# Altium schematic symbol library Centralize.SchLib: 1081 symbols (part 24 of 26)
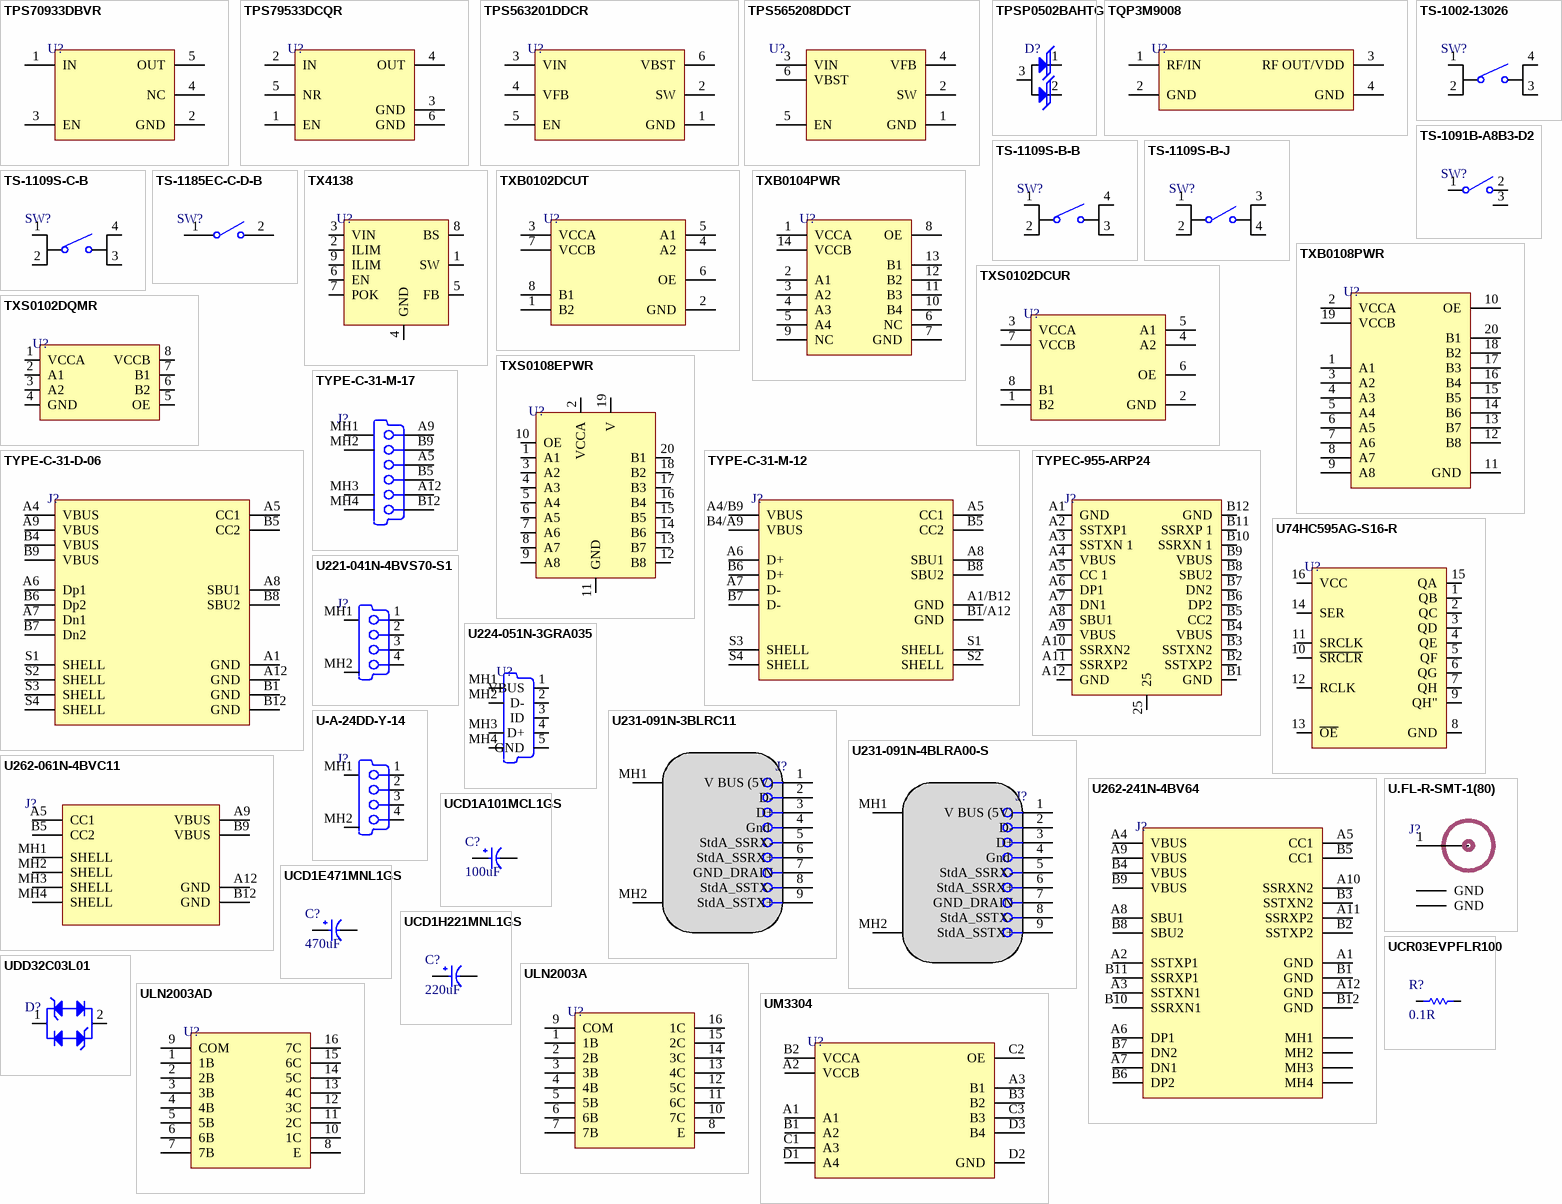
[diagram p70: symbols TPS70933DBVR to UM3304]

## ULN2003AD
designator U?
TRANS 7NPN DARL 50V 0.5A 16SOIC; Manufacturer: Texas Instruments; Manufacturer Part Number: ULN2003AD; Max Collector Current: 500mA; Number of Elements: 7; Polarity: NPN; Collector Emitter Saturation Voltage: 1.1V; Collector-emitter Voltage-Max: 1.6V; Max Power Dissipation: 25W; Item Type: IC; Supplier 1: Arrow Electronics; RoHS: Yes; Category: Integrated Circuits (ICs); Stock 1: 228; Pricing 1: 1=1.68680, 10=1.54200, 100=1.39890, 500=1.31050, 1000=1.23410 (USD); Mount: Surface Mount; Case/Package: SOIC; Number of Pins: 16; Weight: 0.004998oz; Contact Plating: Gold; Min Operating Temperature: -20°C; Max Operating Temperature: 70°C; Packaging: Rail/Tube; Collector Emitter Voltage (VCEO): 50V; Package Quantity: 40; Series: Automotive, AEC-Q100; Number of Drivers: 7; Collector Emitter Breakdown Voltage: 50V; Voltage Rating (DC): 50V; Current Rating: 500mA; Emitter Base Voltage (VEBO): 50V; Output Current: 500mA; Length: 9.9mm; Width: 3.91mm; Height: 1.58mm; Radiation Hardening: No; Lead Free: Lead Free; RoHS Compliant: Yes; Reach SVHC Compliant: Yes; ComponentLink1URL: https://datasheet.ciiva.com/15139/getdatasheetpartid-47909-15139875.pdf?src-supplier=Verical; ComponentLink1Description: https://datasheet.ciiva.com/15139/getdatasheetpartid-47909-15139875.pdf?src-supplier=Verical; ComponentLink2URL: https://datasheet.ciiva.com/1193/1908148-1193405.pdf?src-supplier=Element14; ComponentLink2Description: https://datasheet.ciiva.com/1193/1908148-1193405.pdf?src-supplier=Element14; ComponentLink3URL: https://datasheet.ciiva.com/1702/uln2003a-1702173.pdf?src-supplier=Digi-Key; ComponentLink3Description: https://datasheet.ciiva.com/1702/uln2003a-1702173.pdf?src-supplier=Digi-Key; ComponentLink4URL: https://datasheet.ciiva.com/14424/ulq2003a-14424058.pdf?src-supplier=Avnet; ComponentLink4Description: https://datasheet.ciiva.com/14424/ulq2003a-14424058.pdf?src-supplier=Avnet; Supplier Part Number 1: ULN2003AD; LCSC Part Number: C908113
footprint 16-SOIC
pins: 1 1B, 2 2B, 3 3B, 4 4B, 5 5B, 6 6B, 7 7B, 8 E, 9 COM, 10 1C, 11 2C, 12 3C, 13 4C, 14 5C, 15 6C, 16 7C

## UM3304
designator U?
4 BIT BIDIRECTIONAL TRANSLATOR; Manufacturer: Union Semiconductor; Manufacturer Part Number: UM3304; Item Type: IC; Supplier 1: Arrow Electronics; RoHS: No; Supplier Part Number 1: UM3304
footprint 12-CSP (1.86x1.36)
pins: A1 A1 , A2 VCCB, A3 B1, B1 A2, B2 VCCA, B3 B2, C1 A3, C2 OE, C3 B3, D1 A4, D2 GND, D3 B4

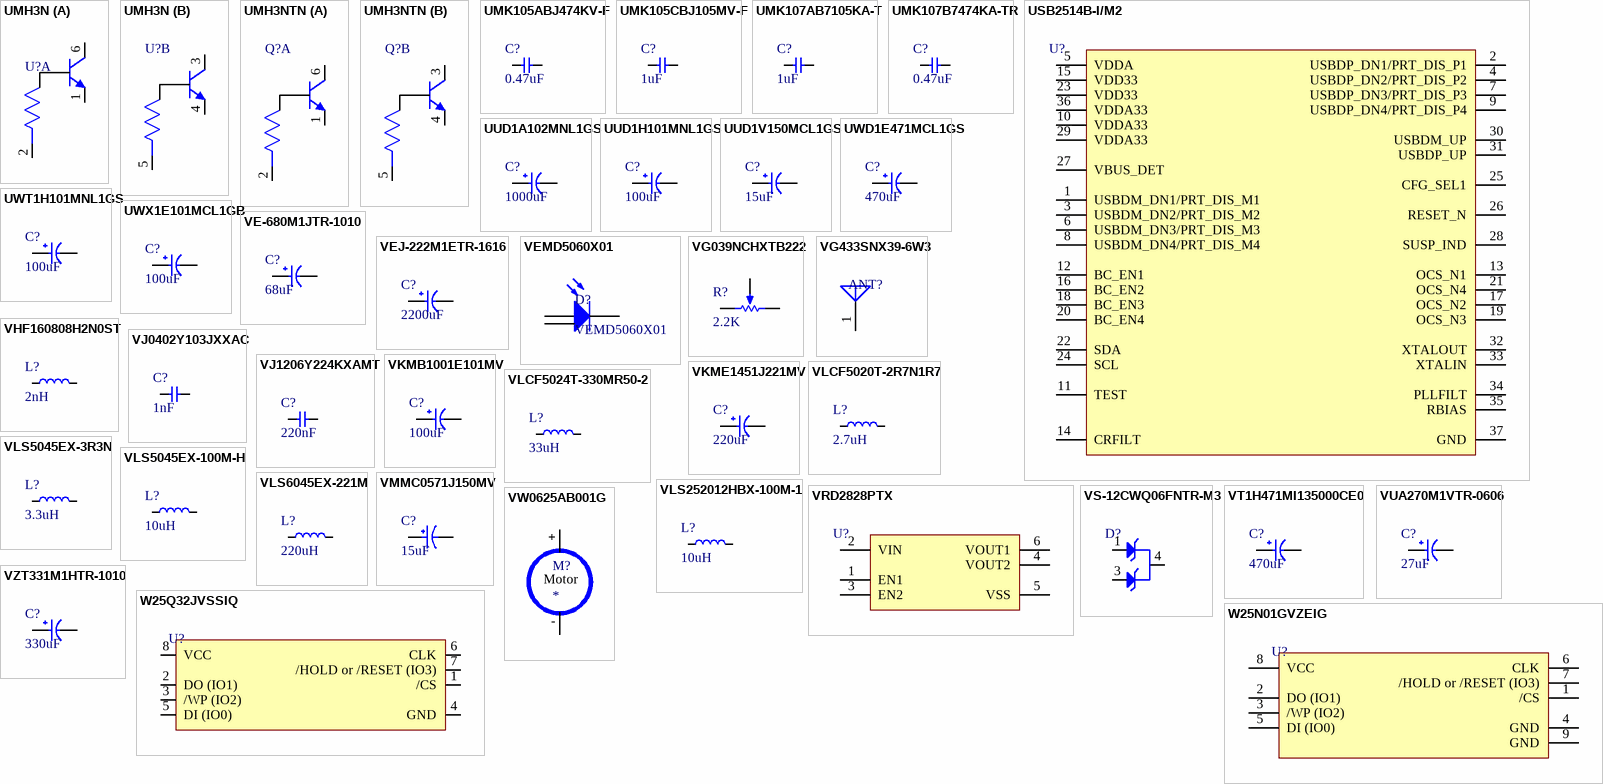
[diagram p44: symbols UMH3N to W25Q32JVSSIQ]

## UMH3N
designator U?
2 NPN pre-biased (Dual) 150mW 100mA 50V SC-70-6(SOT-363) Digital Transistors ROHS; Manufacturer: Changjiang; Manufacturer Part Number: UMH3N; Footprint: SC-70-6(SOT-363); ComponentLink1Description: LCSC; ComponentLink1URL: https://www.lcsc.com/product-detail/Digital-Transistors_Jiangsu-Changjing-Electronics-Technology-Co-Ltd-UMH3N_C62892.html; LCSC Part Number: C62892; Item Type: Transistor
footprint SC-70-6_
part A pins: 1 E, 2, 6 C
part B pins: 3 C, 4 E, 5

## UMH3NTN
designator Q?
TRANS 2NPN PREBIAS 0.15W UMT6; Manufacturer: Rohm; Manufacturer Part Number: UMH3NTN; Collector Emitter Voltage (VCEO): 50V; Emitter Base Voltage (VEBO): 5V; Max Collector Current: 100mA; Element Configuration: Dual; hFE Min: 100; Polarity: NPN; Power Dissipation: 150mW; Transition Frequency: 250MHz; Item Type: Transistor; Supplier 1: Digi-Key; Stock 1: 12797; Pricing 1: 1=0.39, 10=0.293, 25=0.264, 100=0.1392, 500=0.12336, 1000=0.096 (USD); Mount: Surface Mount; Case/Package: SOT-363; Number of Pins: 6; Min Operating Temperature: -55°C; Max Operating Temperature: 150°C; Max Output Current: 100mA; Operating Supply Voltage: 50V; Packaging: Tape and Reel; Package Quantity: 1; Continuous Collector Current: 100mA; Collector Emitter Breakdown Voltage: 50V; Max Power Dissipation: 150mW; Max Breakdown Voltage: 50V; Voltage Rating (DC): 50V; Current Rating: 100mA; Collector Base Voltage (VCBO): 50V; Radiation Hardening: No; REACH SVHC: No SVHC; Lead Free: Lead Free; ComponentLink1URL: http://www.farnell.com/datasheets/1645293.pdf?src-supplier=Element14; ComponentLink1Description: http://www.farnell.com/datasheets/1645293.pdf?src-supplier=Element14; ComponentLink2URL: http://rohmfs.rohm.com/en/products/databook/datasheet/discrete/transistor/digital/emh3t2r-e.pdf?src-supplier=Digi-Key; ComponentLink2Description: http://rohmfs.rohm.com/en/products/databook/datasheet/discrete/transistor/digital/emh3t2r-e.pdf?src-supplier=Digi-Key; ComponentLink3URL: http://rohmfs.rohm.com/en/techdata_basic/transistor/taping/UMT6_TN_taping.pdf?src-supplier=Digi-Key; ComponentLink3Description: http://rohmfs.rohm.com/en/techdata_basic/transistor/taping/UMT6_TN_taping.pdf?src-supplier=Digi-Key; ComponentLink4URL: http://www.produktinfo.conrad.com/datenblaetter/125000-149999/140593-da-01-en-TRANSISTOR_UMH3_NTN_SOT_363.pdf?src-supplier=Conrad; ComponentLink4Description: http://www.produktinfo.conrad.com/datenblaetter/125000-149999/140593-da-01-en-TRANSISTOR_UMH3_NTN_SOT_363.pdf?src-supplier=Conrad; Supplier Part Number 1: UMH3NTNCT-ND; LCSC Part Number: C123008
footprint UMT6 (Dual Digital Transistors)
part A pins: 1 E, 2, 6 C
part B pins: 3 C, 4 E, 5

## UMK105ABJ474KV-F
designator C?, comment 0.47uF
CAP CER 0.47UF 50V X5R 0402; Manufacturer: Taiyo Yuden; Manufacturer Part Number: UMK105ABJ474KV-F; Capacitance: 470nF; Tolerance: 10%; Item Type: Capacitor; Supplier 1: Digi-Key; RoHS: Yes; Category: Ceramic Capacitors; Stock 1: 145003; Pricing 1: 1=0.24000, 10=0.16100, 50=0.09680, 100=0.08170, 500=0.05592, 1000=0.04946, 2500=0.04731, 5000=0.04301 (USD); Mount: Surface Mount; Case/Package: 0402; Case Code (Metric): 1005; Case Code (Imperial): 0402; Min Operating Temperature: -55°C; Max Operating Temperature: 85°C; Package Quantity: 10000; Packaging: Tape and Reel; Voltage Rating: 50V; Voltage Rating (DC): 50V; Dielectric: X5R; Termination: SMD/SMT; Length: 0.039inch; Width: 0.02inch; Height: 0.5mm; Thickness: 0.022inch; Lead Free: Lead Free; RoHS Compliant: Yes; ComponentLink1URL: https://datasheet.ciiva.com/30249/584umk105abj474kv-f-30249824.pdf?src-supplier=Onlinecomponents.com; ComponentLink1Description: https://datasheet.ciiva.com/30249/584umk105abj474kv-f-30249824.pdf?src-supplier=Onlinecomponents.com; ComponentLink2URL: https://datasheet.ciiva.com/24370/10umk105abj474kv-f-24370678.pdf?src-supplier=Onlinecomponents.com; ComponentLink2Description: https://datasheet.ciiva.com/24370/10umk105abj474kv-f-24370678.pdf?src-supplier=Onlinecomponents.com; ComponentLink3URL: https://datasheet.ciiva.com/18697/mlcc-all-e-18697429.pdf?src-supplier=Digi-Key; ComponentLink3Description: https://datasheet.ciiva.com/18697/mlcc-all-e-18697429.pdf?src-supplier=Digi-Key; ComponentLink4URL: https://datasheet.ciiva.com/18697/mlcc-all-e-18697430.pdf?src-supplier=Digi-Key; ComponentLink4Description: https://datasheet.ciiva.com/18697/mlcc-all-e-18697430.pdf?src-supplier=Digi-Key; ComponentLink5URL: https://datasheet.ciiva.com/18697/mlcc-all-e-18697431.pdf?src-supplier=Digi-Key; ComponentLink5Description: https://datasheet.ciiva.com/18697/mlcc-all-e-18697431.pdf?src-supplier=Digi-Key; Supplier Part Number 1: 587-3497-1-ND; LCSC Part Number: C386109
footprint Cap-0402
pins: 1, 2

## UMK105CBJ105MV-F
designator C?, comment 1uF
CAP CER 1UF 50V X5R 0402; Manufacturer: Taiyo Yuden; Manufacturer Part Number: UMK105CBJ105MV-F; Item Type: Capacitor; Supplier 1: Digi-Key; Stock 1: 412061; Pricing 1: 1=0.27, 10=0.184, 50=0.1224, 100=0.104, 500=0.07342, 1000=0.06424, 2500=0.06118, 5000=0.05659 (USD); Lead Free: Lead Free; RoHS Compliant: Yes; ComponentLink1URL: http://www.farnell.com/datasheets/2801300.pdf?src-supplier=Newark; ComponentLink1Description: http://www.farnell.com/datasheets/2801300.pdf?src-supplier=Newark; ComponentLink2URL: http://www.farnell.com/datasheets/2801300.pdf?src-supplier=Farnell; ComponentLink2Description: http://www.farnell.com/datasheets/2801300.pdf?src-supplier=Farnell; ComponentLink3URL: https://ds.yuden.co.jp/TYCOMPAS/ut/detail?pn=UMK105CBJ105MV-F &amp;u=M&src-supplier=Digi-Key; ComponentLink3Description: https://ds.yuden.co.jp/TYCOMPAS/ut/detail?pn=UMK105CBJ105MV-F &amp;u=M&src-supplier=Digi-Key; Supplier Part Number 1: 587-6278-1-ND; LCSC Part Number: C2880413
footprint Cap-0402
pins: 1, 2

## UMK107AB7105KA-T
designator C?, comment 1uF
CAP CER 1UF 50V X7R 0603; Manufacturer: Taiyo Yuden; Manufacturer Part Number: UMK107AB7105KA-T; Tolerance: 10%; Item Type: Capacitor; ComponentLink1URL: http://www.farnell.com/datasheets/2048165.pdf?src-supplier=Element14; ComponentLink1Description: http://www.farnell.com/datasheets/2048165.pdf?src-supplier=Element14; ComponentLink2URL: https://www.murata.com/~/media/webrenewal/support/library/catalog/products/capacitor/mlcc/c02e.ashx?la=en-us&src-supplier=Digi-Key; ComponentLink2Description: https://www.murata.com/~/media/webrenewal/support/library/catalog/products/capacitor/mlcc/c02e.ashx?la=en-us&src-supplier=Digi-Key; Supplier 1: Digi-Key; Stock 1: 453098; Pricing 1: 1=0.28, 10=0.19, 100=0.1079, 500=0.0762, 1000=0.0667 (USD); Mount: Surface Mount; Case/Package: 0603; Case Code (Metric): 1608; Case Code (Imperial): 0603; Min Operating Temperature: -55°C; Max Operating Temperature: 125°C; Packaging: Tape and Reel; Package Quantity: 1; Capacitance: 1uF; Voltage Rating: 50V; Voltage Rating (DC): 50V; Dielectric: X7R; Termination: SMD/SMT; Length: 1.6mm; Height: 0.8mm; Width: 0.031inch; Thickness: 0.037inch; Depth: 0.8mm; Radiation Hardening: No; Halogen Free: Halogen Free; ComponentLink3URL: https://www.yuden.co.jp/productdata/catalog/mlcc_all_e.pdf?src-supplier=Digi-Key; ComponentLink3Description: https://www.yuden.co.jp/productdata/catalog/mlcc_all_e.pdf?src-supplier=Digi-Key; ComponentLink4URL: https://www.yuden.co.jp/productdata/catalog/mlcc_all_e.pdf?src-supplier=Onlinecomponents.com; ComponentLink4Description: https://www.yuden.co.jp/productdata/catalog/mlcc_all_e.pdf?src-supplier=Onlinecomponents.com; Supplier Part Number 1: 587-3247-1-ND; LCSC Part Number: C105174
footprint Cap-0603
pins: 1, 2

## UMK107B7474KA-TR
designator C?, comment 0.47uF
CAP CER 0.47uF 50V X7R 0603; Manufacturer: Taiyo Yuden; Manufacturer Part Number: UMK107B7474KA-TR; Tolerance: 10%; Capacitance: 470nF; Item Type: Capacitor; Supplier 1: Digi-Key; RoHS: Yes; Category: Ceramic Capacitors; Stock 1: 81; Pricing 1: 1=0.21000, 10=0.14800, 50=0.08400, 100=0.06950, 500=0.04876, 1000=0.04036 (USD); Mount: Surface Mount; Case/Package: 0603; Case Code (Metric): 1608; Case Code (Imperial): 0603; Min Operating Temperature: -55°C; Max Operating Temperature: 125°C; Packaging: Tape and Reel; Voltage Rating: 50V; Package Quantity: 1; Dielectric: X7R; Termination: SMD/SMT; Voltage: 50V; Series: M; Voltage Rating (DC): 50V; Construction: Flat; Length: 1.6mm; Width: 0.031inch; Height: 0.8mm; Depth: 0.8mm; Thickness: 0.035inch; Radiation Hardening: No; RoHS Compliant: Yes; Lead Free: Lead Free; Halogen Free: Halogen Free; ComponentLink1URL: https://datasheet.ciiva.com/30063/972umk107b7474ka-tr-30063804.pdf?src-supplier=Onlinecomponents.com; ComponentLink1Description: https://datasheet.ciiva.com/30063/972umk107b7474ka-tr-30063804.pdf?src-supplier=Onlinecomponents.com; ComponentLink2URL: https://datasheet.ciiva.com/11600/umk107b7474ka-tr-ss-11600367.pdf?src-supplier=Avnet; ComponentLink2Description: https://datasheet.ciiva.com/11600/umk107b7474ka-tr-ss-11600367.pdf?src-supplier=Avnet; ComponentLink3URL: https://datasheet.ciiva.com/15922/257umk107b7474ka-tr-15922607.pdf?src-supplier=Onlinecomponents.com; ComponentLink3Description: https://datasheet.ciiva.com/15922/257umk107b7474ka-tr-15922607.pdf?src-supplier=Onlinecomponents.com; ComponentLink4URL: https://datasheet.ciiva.com/6274/mlcc-all-e-6274710.pdf?src-supplier=Digi-Key; ComponentLink4Description: https://datasheet.ciiva.com/6274/mlcc-all-e-6274710.pdf?src-supplier=Digi-Key; ComponentLink5URL: https://datasheet.ciiva.com/5412/mlcc01-e-5412119.pdf?src-supplier=Mouser; ComponentLink5Description: https://datasheet.ciiva.com/5412/mlcc01-e-5412119.pdf?src-supplier=Mouser; ComponentLink6URL: https://datasheet.ciiva.com/6274/mlcc-all-e-6274712.pdf?src-supplier=Digi-Key; ComponentLink6Description: https://datasheet.ciiva.com/6274/mlcc-all-e-6274712.pdf?src-supplier=Digi-Key; ComponentLink7URL: https://datasheet.ciiva.com/6274/mlcc-all-e-6274713.pdf?src-supplier=Digi-Key; ComponentLink7Description: https://datasheet.ciiva.com/6274/mlcc-all-e-6274713.pdf?src-supplier=Digi-Key; Supplier Part Number 1: 587-3170-1-ND; LCSC Part Number: C92847
footprint Cap-0603
pins: 1, 2

## USB2514B-I/M2
designator U?
IC HUB CTLR 4PORT USB 2.0 HS 36S; Manufacturer: Microchip; Manufacturer Part Number: USB2514B-I/M2; Operating Supply Current: 70mA; Min Supply Voltage: 3V; Max Supply Voltage: 3.6V; Data Rate: 480Mbps; Number of Ports: 4; USB Standard: USB 2.0; Supplier 1: Digi-Key; Stock 1: 0; Pricing 1: 1=3.09, 25=2.6336 (USD); Number of Pins: 36; Min Operating Temperature: -40°C; Max Operating Temperature: 85°C; Packaging: Tray; Interface: USB; REACH SVHC: No SVHC; Lead Free: Lead Free; RoHS Compliant: Yes; ComponentLink1URL: http://www.microchip.com/mymicrochip/filehandler.aspx?ddocname=en562310&src-supplier=Digi-Key; ComponentLink1Description: http://www.microchip.com/mymicrochip/filehandler.aspx?ddocname=en562310&src-supplier=Digi-Key; ComponentLink2URL: http://www.farnell.com/datasheets/2032129.pdf?src-supplier=Element14; ComponentLink2Description: http://www.farnell.com/datasheets/2032129.pdf?src-supplier=Element14; ComponentLink3URL: http://www.farnell.com/datasheets/2032129.pdf?src-supplier=Farnell; ComponentLink3Description: http://www.farnell.com/datasheets/2032129.pdf?src-supplier=Farnell; Supplier Part Number 1: USB2514B-I/M2-ND; LCSC Part Number: C220679; Item Type: IC
footprint SQFN-36
pins: 1 USBDM_DN1/PRT_DIS_M1, 2 USBDP_DN1/PRT_DIS_P1, 3 USBDM_DN2/PRT_DIS_M2, 4 USBDP_DN2/PRT_DIS_P2, 5 VDDA, 6 USBDM_DN3/PRT_DIS_M3, 7 USBDP_DN3/PRT_DIS_P3, 8 USBDM_DN4/PRT_DIS_M4, 9 USBDP_DN4/PRT_DIS_P4, 10 VDDA33, 11 TEST, 12 BC_EN1, 13 OCS_N1, 14 CRFILT, 15 VDD33, 16 BC_EN2, 17 OCS_N2, 18 BC_EN3, 19 OCS_N3, 20 BC_EN4, 21 OCS_N4, 22 SDA, 23 VDD33, 24 SCL, 25 CFG_SEL1, 26 RESET_N, 27 VBUS_DET, 28 SUSP_IND, 29 VDDA33, 30 USBDM_UP, 31 USBDP_UP, 32 XTALOUT, 33 XTALIN, 34 PLLFILT, 35 RBIAS, 36 VDDA33, 37 GND

## UUD1A102MNL1GS
designator C?, comment 1000uF
CAP ALUM 1000UF 20% 10V SMD; Manufacturer: Nichicon; Manufacturer Part Number: UUD1A102MNL1GS; Dielectric Material: Aluminium; Ripple Current: 670mA; Impedance: 90mR; Value: 1mF; Leakage Current: 3uA; Life (Hours): 5000Hour; Dissipation Factor: 0.24%; Lead Diameter: 1.1mm; Item Type: Capacitor; Supplier 1: Arrow Electronics; RoHS: Yes; Category: Aluminum Electrolytic Capacitors; Stock 1: 26500; Pricing 1: 500=0.33690, 1000=0.29090, 2500=0.27810, 5000=0.26240, 12500=0.24280, 25000=0.24040 (USD); Case/Package: Radial; Pins: 2; Min Operating Temperature: -55°C; Max Operating Temperature: 105°C; Tolerance: 20%; Package Quantity: 1; Voltage Rating (DC): 10V; Ripple Current (AC): 670mA; Packaging: Tape and Reel; Voltage Rating: 10V; Termination: SMD/SMT; Voltage: 10V; Series: UD; Construction: Cylindrical; Diameter: 10mm; Length: 10mm; Height: 10mm; Lead Pitch: 4.5mm; Height - Seated (Max): 0.394inch; Radiation Hardening: No; Reach SVHC Compliant: Yes; Lead Free: Lead Free; RoHS Compliant: Yes; ComponentLink1URL: https://datasheet.ciiva.com/98/e-ud-98263.pdf?src-supplier=Digi-Key; ComponentLink1Description: https://datasheet.ciiva.com/98/e-ud-98263.pdf?src-supplier=Digi-Key; ComponentLink2URL: https://datasheet.ciiva.com/16502/e-ud-16502759.pdf?src-supplier=Future+Electronics; ComponentLink2Description: https://datasheet.ciiva.com/16502/e-ud-16502759.pdf?src-supplier=Future+Electronics; ComponentLink3URL: https://datasheet.ciiva.com/98/e-ud-98264.pdf?src-supplier=Digi-Key; ComponentLink3Description: https://datasheet.ciiva.com/98/e-ud-98264.pdf?src-supplier=Digi-Key; ComponentLink4URL: https://datasheet.ciiva.com/28458/e-ud-28458024.pdf?src-supplier=Element14; ComponentLink4Description: https://datasheet.ciiva.com/28458/e-ud-28458024.pdf?src-supplier=Element14; ComponentLink5URL: https://datasheet.ciiva.com/98/e-ud-98265.pdf?src-supplier=Digi-Key; ComponentLink5Description: https://datasheet.ciiva.com/98/e-ud-98265.pdf?src-supplier=Digi-Key; ComponentLink6URL: https://datasheet.ciiva.com/7793/66055-7793131.pdf?src-supplier=Element14; ComponentLink6Description: https://datasheet.ciiva.com/7793/66055-7793131.pdf?src-supplier=Element14; ComponentLink7URL: https://datasheet.ciiva.com/22693/66055-22693549.pdf?src-supplier=Element14; ComponentLink7Description: https://datasheet.ciiva.com/22693/66055-22693549.pdf?src-supplier=Element14; Supplier Part Number 1: UUD1A102MNL1GS; LCSC Part Number: C445277
footprint UUD1A102MNL1GS
pins: 1, 2

## UUD1H101MNL1GS
designator C?, comment 100uF
CAP ALUM 100UF 20% 50V SMD; Manufacturer: Nichicon; Manufacturer Part Number: UUD1H101MNL1GS; Dielectric Material: Aluminium; Ripple Current: 300mA; Life (Hours): 5000Hour; Impedance: 340mR; Leakage Current: 3uA; Dissipation Factor: 0.14%; Lead Diameter: 1.1mm; Item Type: Capacitor; Supplier 1: Digi-Key; RoHS: Yes; Category: Aluminum Electrolytic Capacitors; Pricing 1: 1=0.62000, 10=0.44000, 50=0.33300, 100=0.29000 (USD); Case/Package: Radial; Number of Pins: 2; Min Operating Temperature: -55°C; Max Operating Temperature: 105°C; Tolerance: 20%; Capacitance: 100uF; Ripple Current (AC): 300mA; Voltage Rating (DC): 50V; Package Quantity: 500; Packaging: Tape and Reel; Voltage Rating: 50V; Termination: SMD/SMT; Voltage: 50V; Series: UD; Construction: Cylindrical; Diameter: 8mm; Length: 10mm; Height: 10mm; Lead Pitch: 3.1mm; Height - Seated (Max): 0.394inch; Radiation Hardening: No; REACH SVHC: No SVHC; Lead Free: Lead Free; RoHS Compliant: Yes; ComponentLink1URL: https://datasheet.ciiva.com/6002/66055-6002224.pdf?src-supplier=Farnell; ComponentLink1Description: https://datasheet.ciiva.com/6002/66055-6002224.pdf?src-supplier=Farnell; ComponentLink2URL: https://datasheet.ciiva.com/11781/0900766b80fa39e7-11781901.pdf?src-supplier=RSComponents; ComponentLink2Description: https://datasheet.ciiva.com/11781/0900766b80fa39e7-11781901.pdf?src-supplier=RSComponents; ComponentLink3URL: https://datasheet.ciiva.com/97/e-ud-97939.pdf?src-supplier=Digi-Key; ComponentLink3Description: https://datasheet.ciiva.com/97/e-ud-97939.pdf?src-supplier=Digi-Key; ComponentLink4URL: https://datasheet.ciiva.com/97/e-ud-97940.pdf?src-supplier=Digi-Key; ComponentLink4Description: https://datasheet.ciiva.com/97/e-ud-97940.pdf?src-supplier=Digi-Key; ComponentLink5URL: https://datasheet.ciiva.com/97/e-ud-97941.pdf?src-supplier=Digi-Key; ComponentLink5Description: https://datasheet.ciiva.com/97/e-ud-97941.pdf?src-supplier=Digi-Key; ComponentLink6URL: https://datasheet.ciiva.com/28458/e-ud-28458117.pdf?src-supplier=Element14; ComponentLink6Description: https://datasheet.ciiva.com/28458/e-ud-28458117.pdf?src-supplier=Element14; ComponentLink7URL: https://datasheet.ciiva.com/28458/1910936-28458133.pdf?src-supplier=Element14; ComponentLink7Description: https://datasheet.ciiva.com/28458/1910936-28458133.pdf?src-supplier=Element14; ComponentLink8URL: https://datasheet.ciiva.com/5362/e-ud-5362134.pdf?src-supplier=Mouser; ComponentLink8Description: https://datasheet.ciiva.com/5362/e-ud-5362134.pdf?src-supplier=Mouser; ComponentLink9URL: https://datasheet.ciiva.com/7781/66055-7781450.pdf?src-supplier=Element14; ComponentLink9Description: https://datasheet.ciiva.com/7781/66055-7781450.pdf?src-supplier=Element14; ComponentLink10URL: https://datasheet.ciiva.com/17354/e-ud-17354671.pdf?src-supplier=Avnet+Europe; ComponentLink10Description: https://datasheet.ciiva.com/17354/e-ud-17354671.pdf?src-supplier=Avnet+Europe; Supplier Part Number 1: 493-2306-6-ND; LCSC Part Number: C116241
footprint UUD-100uF-8mmDia (0.327" L x 0.327" W (8.30mm x 8.30mm))
pins: 1, 2

## UUD1V150MCL1GS
designator C?, comment 15uF
CAP ALUM 15UF 20% 35V SMD; Manufacturer: Nichicon; Manufacturer Part Number: UUD1V150MCL1GS; Dielectric Material: Aluminium; Ripple Current: 150mA; Impedance: 760mR; Leakage Current: 5.25uA; Life (Hours): 2000Hour; Item Type: Capacitor; Supplier 1: Arrow Electronics; RoHS: Yes; Category: Aluminum Electrolytic Capacitors; Stock 1: 1; Pricing 1: 1=0.1001 (USD); Case/Package: Radial; Pins: 2; Min Operating Temperature: -55°C; Max Operating Temperature: 105°C; Package Quantity: 1000; Voltage Rating (DC): 35V; Tolerance: 20%; Packaging: Tape and Reel; Value: 15uF; Voltage Rating: 35V; Termination: SMD/SMT; Series: UD; Construction: Cylindrical; Diameter: 5mm; Length: 5.8mm; Height: 5.8mm; Radiation Hardening: No; Lead Free: Lead Free; RoHS Compliant: Yes; ComponentLink1URL: https://datasheet.ciiva.com/96/e-ud-96810.pdf?src-supplier=Digi-Key; ComponentLink1Description: https://datasheet.ciiva.com/96/e-ud-96810.pdf?src-supplier=Digi-Key; ComponentLink2URL: https://datasheet.ciiva.com/96/e-ud-96811.pdf?src-supplier=Digi-Key; ComponentLink2Description: https://datasheet.ciiva.com/96/e-ud-96811.pdf?src-supplier=Digi-Key; ComponentLink3URL: https://datasheet.ciiva.com/96/e-ud-96812.pdf?src-supplier=Digi-Key; ComponentLink3Description: https://datasheet.ciiva.com/96/e-ud-96812.pdf?src-supplier=Digi-Key; Supplier Part Number 1: UUD1V150MCL1GS; LCSC Part Number: C445253
footprint UUD1V150MCL1GS
pins: 1, 2

## UWD1E471MCL1GS
designator C?, comment 470uF
CAP ALUM 470UF 20% 25V SMD; Manufacturer: Nichicon; Manufacturer Part Number: UWD1E471MCL1GS; Material: Aluminium; Ripple Current: 670mA; Impedance: 90mR; Leakage Current: 52.8uA; Life (Hours): 5000Hour; Dissipation Factor: 0.16%; Item Type: Capacitor; Supplier 1: Digi-Key; RoHS: Yes; Category: Aluminum Electrolytic Capacitors; Pricing 1: 1=0.87000, 10=0.64000, 50=0.51200, 100=0.43880 (USD); Mount: Surface Mount; Case/Package: SMD/SMT; Contact Plating: Tin; Min Operating Temperature: -55°C; Max Operating Temperature: 105°C; Capacitance: 470uF; Tolerance: 20%; Package Quantity: 1; Voltage Rating: 25V; Packaging: Tape and Reel; Voltage Rating (DC): 25V; Termination: SMD/SMT; Voltage: 25V; Features: General Purpose; Series: WD; Construction: Cylindrical; Diameter: 10mm; Length: 10mm; Height: 10mm; Height - Seated (Max): 0.394inch; Lead Pitch: 4.5mm; Radiation Hardening: No; Lead Free: Lead Free; RoHS Compliant: Yes; ComponentLink1URL: https://datasheet.ciiva.com/11783/0900766b8080ae55-11783126.pdf?src-supplier=RSComponents; ComponentLink1Description: https://datasheet.ciiva.com/11783/0900766b8080ae55-11783126.pdf?src-supplier=RSComponents; ComponentLink2URL: https://datasheet.ciiva.com/17523/e-wd-17523158.pdf?src-supplier=Avnet+Europe; ComponentLink2Description: https://datasheet.ciiva.com/17523/e-wd-17523158.pdf?src-supplier=Avnet+Europe; ComponentLink3URL: https://datasheet.ciiva.com/11684/e-wd-11684711.pdf?src-supplier=Avnet; ComponentLink3Description: https://datasheet.ciiva.com/11684/e-wd-11684711.pdf?src-supplier=Avnet; ComponentLink4URL: https://datasheet.ciiva.com/5362/e-wd-5362606.pdf?src-supplier=Mouser; ComponentLink4Description: https://datasheet.ciiva.com/5362/e-wd-5362606.pdf?src-supplier=Mouser; ComponentLink5URL: https://datasheet.ciiva.com/16512/e-wd-16512734.pdf?src-supplier=Future+Electronics; ComponentLink5Description: https://datasheet.ciiva.com/16512/e-wd-16512734.pdf?src-supplier=Future+Electronics; ComponentLink6URL: https://datasheet.ciiva.com/15036/e-wd-15036959.pdf?src-supplier=Digi-Key; ComponentLink6Description: https://datasheet.ciiva.com/15036/e-wd-15036959.pdf?src-supplier=Digi-Key; ComponentLink7URL: https://datasheet.ciiva.com/41751/404632-da-01-en-smd-aluminium-kondensator-470uf-25v-41751238.pdf?src-supplier=Conrad; ComponentLink7Description: https://datasheet.ciiva.com/41751/404632-da-01-en-smd-aluminium-kondensator-470uf-25v-41751238.pdf?src-supplier=Conrad; Supplier Part Number 1: 493-9671-1-ND; LCSC Part Number: C251022
footprint UWD-470uF-10mmDia (0.406" L x 0.406" W (10.30mm x 10.30mm))
pins: 1, 2

## UWT1H101MNL1GS
designator C?, comment 100uF
CAP ALUM 100UF 20% 50V SMD; Manufacturer: Nichicon; Manufacturer Part Number: UWT1H101MNL1GS; Dielectric Material: Aluminium; Ripple Current: 140mA; Leakage Current: 3uA; Life (Hours): 1000Hour; Dissipation Factor: 0.14%; Item Type: Capacitor; Supplier 1: Digi-Key; Stock 1: 24169; Pricing 1: 1=0.57, 10=0.405, 50=0.3058, 100=0.2664 (USD); Mount: Surface Mount; Case/Package: Radial; Number of Pins: 2; Min Operating Temperature: -55°C; Max Operating Temperature: 105°C; Capacitance: 100uF; Tolerance: 20%; Package Quantity: 500; Voltage Rating: 50V; Packaging: Tape and Reel; Ripple Current (AC): 140mA; Voltage Rating (DC): 50V; Termination: SMD/SMT; Voltage: 50V; Series: WT; Construction: Cylindrical; Diameter: 8mm; Length: 10mm; Height: 10mm; Height - Seated (Max): 0.413inch; Radiation Hardening: No; REACH SVHC: No SVHC; Lead Free: Lead Free; RoHS Compliant: Yes; ComponentLink1URL: http://www.farnell.com/datasheets/2100058.pdf?src-supplier=Element14; ComponentLink1Description: http://www.farnell.com/datasheets/2100058.pdf?src-supplier=Element14; ComponentLink2URL: http://www.farnell.com/datasheets/2576809.pdf?src-supplier=Element14; ComponentLink2Description: http://www.farnell.com/datasheets/2576809.pdf?src-supplier=Element14; ComponentLink3URL: http://www.nichicon.co.jp/english/products/pdfs/e-ch_ref.pdf?src-supplier=Digi-Key; ComponentLink3Description: http://www.nichicon.co.jp/english/products/pdfs/e-ch_ref.pdf?src-supplier=Digi-Key; ComponentLink4URL: http://www.mouser.com/ds/2/293/e-wt-30307.pdf?src-supplier=Mouser; ComponentLink4Description: http://www.mouser.com/ds/2/293/e-wt-30307.pdf?src-supplier=Mouser; ComponentLink5URL: http://uk.rs-online.com/webdocs/13ec/0900766b813ecfdc.pdf?src-supplier=RSComponents; ComponentLink5Description: http://uk.rs-online.com/webdocs/13ec/0900766b813ecfdc.pdf?src-supplier=RSComponents; ComponentLink6URL: http://www.nichicon.co.jp/english/products/pdfs/e-wt.pdf?src-supplier=Avnet; ComponentLink6Description: http://www.nichicon.co.jp/english/products/pdfs/e-wt.pdf?src-supplier=Avnet; ComponentLink7URL: http://products.nichicon.co.jp/en/pdf/XJA043/e-wt.pdf?src-supplier=Future+Electronics; ComponentLink7Description: http://products.nichicon.co.jp/en/pdf/XJA043/e-wt.pdf?src-supplier=Future+Electronics; ComponentLink8URL: http://www.nichicon.co.jp/english/products/pdfs/e-wt.pdf?src-supplier=Avnet+Europe; ComponentLink8Description: http://www.nichicon.co.jp/english/products/pdfs/e-wt.pdf?src-supplier=Avnet+Europe; Supplier Part Number 1: 493-2226-1-ND; LCSC Part Number: C445063
footprint UWT1H101MNL1GS_
pins: 1, 2

## UWX1E101MCL1GB
designator C?, comment 100uF
CAP ALUM 100UF 20% 25V SMD; Manufacturer: Nichicon; Manufacturer Part Number: UWX1E101MCL1GB; Dielectric Material: Aluminium; Ripple Current: 110mA; Polarity: Polar; Leakage Current: 3uA; Life (Hours): 2000Hour; Dissipation Factor: 0.14%; Lead Diameter: 0.8mm; Item Type: Capacitor; Supplier 1: Digi-Key; Stock 1: 30613; Pricing 1: 1=0.43, 10=0.301, 50=0.211, 100=0.1808, 500=0.13558 (USD); Mount: Surface Mount; Case/Package: Radial; Number of Pins: 2; Weight: 0.01lb; Min Operating Temperature: -40°C; Max Operating Temperature: 85°C; Capacitance: 100uF; Tolerance: 20%; Ripple Current (AC): 110mA; Voltage Rating: 25V; Packaging: Tape and Reel; Package Quantity: 1000; Voltage Rating (DC): 25V; Termination: SMD/SMT; Voltage: 25V; Series: WX; Construction: Cylindrical; Diameter: 8mm; Length: 5.4mm; Width: 0.25inch; Height: 5.4mm; Lead Pitch: 2.3mm; Height - Seated (Max): 0.213inch; Radiation Hardening: No; REACH SVHC: No SVHC; Lead Free: Lead Free; RoHS Compliant: Yes; ComponentLink1URL: http://nichicon-us.com/english/products/pdfs/e-uwx.pdf?src-supplier=Digi-Key; ComponentLink1Description: http://nichicon-us.com/english/products/pdfs/e-uwx.pdf?src-supplier=Digi-Key; ComponentLink2URL: http://www.nichicon.co.jp/english/products/pdfs/e-ch_ref.pdf?src-supplier=Mouser; ComponentLink2Description: http://www.nichicon.co.jp/english/products/pdfs/e-ch_ref.pdf?src-supplier=Mouser; ComponentLink3URL: http://www.nichicon.co.jp/english/products/pdfs/e-wx.pdf?src-supplier=Avnet; ComponentLink3Description: http://www.nichicon.co.jp/english/products/pdfs/e-wx.pdf?src-supplier=Avnet; ComponentLink4URL: http://uk.rs-online.com/webdocs/0fa3/0900766b80fa3a90.pdf?src-supplier=RSComponents; ComponentLink4Description: http://uk.rs-online.com/webdocs/0fa3/0900766b80fa3a90.pdf?src-supplier=RSComponents; ComponentLink5URL: http://nichicon-us.com/english/products/pdfs/e-wx.pdf?src-supplier=Future+Electronics; ComponentLink5Description: http://nichicon-us.com/english/products/pdfs/e-wx.pdf?src-supplier=Future+Electronics; ComponentLink6URL: http://www.nichicon.co.jp/english/products/pdfs/e-ch_ref.pdf?src-supplier=Avnet+Europe; ComponentLink6Description: http://www.nichicon.co.jp/english/products/pdfs/e-ch_ref.pdf?src-supplier=Avnet+Europe; ComponentLink7URL: http://www.farnell.com/datasheets/2364658.pdf?src-supplier=Element14; ComponentLink7Description: http://www.farnell.com/datasheets/2364658.pdf?src-supplier=Element14; Supplier Part Number 1: 493-2113-6-ND; Supplier 2: Digi-Key; RoHS: Yes; Category: Aluminum Electrolytic Capacitors; Stock 2: 25010; Pricing 2: 1=0.43000, 10=0.30100, 50=0.21100, 100=0.18080, 500=0.13558 (USD); ComponentLink8URL: https://datasheet.ciiva.com/11778/0900766b80fa3a90-11778418.pdf?src-supplier=RSComponents; ComponentLink8Description: https://datasheet.ciiva.com/11778/0900766b80fa3a90-11778418.pdf?src-supplier=RSComponents; ComponentLink9URL: https://datasheet.ciiva.com/17527/e-wx-17527624.pdf?src-supplier=Avnet+Europe; ComponentLink9Description: https://datasheet.ciiva.com/17527/e-wx-17527624.pdf?src-supplier=Avnet+Europe; ComponentLink10URL: https://datasheet.ciiva.com/5361/e-wx-11809-5361100.pdf?src-supplier=Mouser; ComponentLink10Description: https://datasheet.ciiva.com/5361/e-wx-11809-5361100.pdf?src-supplier=Mouser; ComponentLink11URL: https://datasheet.ciiva.com/28458/1912851-28458684.pdf?src-supplier=Element14; ComponentLink11Description: https://datasheet.ciiva.com/28458/1912851-28458684.pdf?src-supplier=Element14; ComponentLink12URL: https://datasheet.ciiva.com/96/e-wx-96650.pdf?src-supplier=Digi-Key; ComponentLink12Description: https://datasheet.ciiva.com/96/e-wx-96650.pdf?src-supplier=Digi-Key; ComponentLink13URL: https://datasheet.ciiva.com/96/e-wx-96651.pdf?src-supplier=Digi-Key; ComponentLink13Description: https://datasheet.ciiva.com/96/e-wx-96651.pdf?src-supplier=Digi-Key; ComponentLink14URL: https://datasheet.ciiva.com/96/e-wx-96652.pdf?src-supplier=Digi-Key; ComponentLink14Description: https://datasheet.ciiva.com/96/e-wx-96652.pdf?src-supplier=Digi-Key; ComponentLink15URL: https://datasheet.ciiva.com/11687/e-wx-11687148.pdf?src-supplier=Avnet; ComponentLink15Description: https://datasheet.ciiva.com/11687/e-wx-11687148.pdf?src-supplier=Avnet; ComponentLink16URL: https://datasheet.ciiva.com/16512/e-wx-16512638.pdf?src-supplier=Future+Electronics; ComponentLink16Description: https://datasheet.ciiva.com/16512/e-wx-16512638.pdf?src-supplier=Future+Electronics; Supplier Part Number 2: 493-2113-1-ND; LCSC Part Number: C125982
footprint UWX1E101MCL1GB_
pins: 1, 2

## VE-680M1JTR-1010
designator C?, comment 68uF
68uF 63V ±20% SMD,D10xL10mm Aluminum Electrolytic Capacitors - SMD ROHS; Manufacturer: Lelon; Manufacturer Part Number: VE-680M1JTR-1010; Package: SMD,D10xL10mm; LCSC Part Number: C249560; Item Type: Capacitor; ComponentLink1Description: LCSC; ComponentLink1URL: https://www.lcsc.com/product-detail/Aluminum-Electrolytic-Capacitors-SMD_Lelon-VE-680M1JTR-1010_C249560.html
footprint VE-680M1JTR-1010
pins: 1, 2

## VEJ-222M1ETR-1616
designator C?, comment 2200uF
2200uF 25V ±20% SMD,D16xL16.5mm Aluminum Electrolytic Capacitors - SMD ROHS; Manufacturer: Lelon; Manufacturer Part Number: VEJ-222M1ETR-1616; Value: 2.2mF; Ripple Current: 900mA; Leakage Current: 4uA; Dissipation Factor: 0.26%; Supplier 1: Arrow Electronics; RoHS: Yes; Category: Uncategorized; Stock 1: 13600; Pricing 1: 1600=0.98300, 2000=0.90070, 3000=0.84100, 4000=0.80380, 5000=0.75290, 10000=0.70330, 50000=0.64130 (USD); Case/Package: Aluminum; Min Operating Temperature: -55°C; Max Operating Temperature: 105°C; Package Quantity: 200; Voltage Rating: 25V; Voltage Rating (DC): 25V; Tolerance: 20%; Packaging: Tape and Reel; Termination: SMD/SMT; Series: VEJ; Length: 16mm; Height: 17mm; ComponentLink1URL: http://www.lelon.com.tw/down.php?f=/file/15.pdf&n=VEJ.pdf&src-supplier=Mouser; ComponentLink1Description: http://www.lelon.com.tw/down.php?f=/file/15.pdf&n=VEJ.pdf&src-supplier=Mouser; Supplier Part Number 1: VEJ222M1ETR-1616; LCSC Part Number: C249624; Item Type: Capacitor
footprint VEJ222M1ETR-1616
pins: 1, 2

## VEMD5060X01
designator D?
Value: VEMD5060X01; Supplier Part Number 1: VEMD5060X01CT-ND; Supplier 1: Digikey; Manufacturer Part Number: VEMD5060X01
footprint VEMD5060X01
pins: 1 A, 2 NC, 3 C, 4 C

## VG039NCHXTB222
designator R?, comment 2.2K
2.2kΩ SMD Variable Resistors/Potentiometers ROHS; Manufacturer: HDK; Manufacturer Part Number: VG039NCHXTB222; ComponentLink1Description: LCSC; ComponentLink1URL: https://lcsc.com/product-detail/Variable-Resistors-Potentiometers_HDK-Hokuriku-Elec-Industry-VG039NCHXTB222_C145162.html; Package: SMD; LCSC Part Number: C145162; Item Type: Resistor
footprint VG039NCHXTB222_
pins: 1, 2, 3

## VG433SNX39-6W3
designator ANT?
2 433 spring antenna 2.5dBi Vertical 433MHz 50Ω DIP Antennas ROHS; Manufacturer: Vollgo; Manufacturer Part Number: VG433SNX39-6W3; Package: DIP; LCSC Part Number: C718844; ComponentLink1Description: LCSC; ComponentLink1URL: https://www.lcsc.com/product-detail/Antennas_Vollgo-VG433SNX39-6W3_C718844.html; Item Type: Antenna
footprint VG433SNX39-6W3
pins: 1 FEED 

## VHF160808H2N0ST
designator L?, comment 2nH
2nH ±0.3nH 0603 Inductors (SMD) ROHS; Manufacturer Part Number: VHF160808H2N0ST; Manufacturer: FH; Footprint: 0603; Value: 2nH; ComponentLink1Description: LCSC; ComponentLink1URL: https://lcsc.com/product-detail/Inductors-SMD_FH-Guangdong-Fenghua-Advanced-Tech-VHF160808H2N0ST_C395081.html; LCSC Part Number: C395081; Item Type: Inductor
footprint IND-0603 (1608 Metric) (0.063" L x 0.032" W (1.60mm x 0.80mm))
pins: 1, 2

## VJ0402Y103JXXAC
designator C?, comment 1nF
CAP CER 10000PF 25V X7R 0402; Manufacturer: Vishay Vitramon; Manufacturer Part Number: VJ0402Y103JXXAC; Capacitance: 10nF; Tolerance: 5%; Item Type: Capacitor; Supplier 1: Digi-Key; Stock 1: 65000; Pricing 1: 5000=0.08639, 10000=0.08131, 15000=0.07877, 25000=0.07623, 50000=0.07115 (USD); Mount: Surface Mount; Case/Package: 0402; Number of Pins: 2; Case Code (Imperial): 0402; Case Code (Metric): 1005; Min Operating Temperature: -55°C; Max Operating Temperature: 150°C; Dielectric: X7R; Packaging: Tape and Reel; Voltage Rating: 25V; Voltage Rating (DC): 25V; Termination: SMD/SMT; Series: VJ COMM; Construction: Flat; Length: 1mm; Width: 0.5mm; Height: 0.6mm; Depth: 0.5mm; Radiation Hardening: No; Lead Free: Lead Free; RoHS Compliant: Yes; ComponentLink1URL: http://www.vishay.com/docs/45199/vjcommercialseries.pdf?src-supplier=Digi-Key; ComponentLink1Description: http://www.vishay.com/docs/45199/vjcommercialseries.pdf?src-supplier=Digi-Key; ComponentLink2URL: http://www.mouser.com/ds/2/427/vjcommercialseries-222796.pdf?src-supplier=Mouser; ComponentLink2Description: http://www.mouser.com/ds/2/427/vjcommercialseries-222796.pdf?src-supplier=Mouser; ComponentLink3URL: http://www.vishay.com/docs/45199/commseri.pdf?src-supplier=Avnet; ComponentLink3Description: http://www.vishay.com/docs/45199/commseri.pdf?src-supplier=Avnet; ComponentLink4URL: http://components.arrow.com/part/dataview/3604811S5190749N4403?src-supplier=Arrow+Electronics; ComponentLink4Description: http://components.arrow.com/part/dataview/3604811S5190749N4403?src-supplier=Arrow+Electronics; ComponentLink5URL: http://components.arrow.com/part/dataview/0323_01555941?src-supplier=Arrow+Europe; ComponentLink5Description: http://components.arrow.com/part/dataview/0323_01555941?src-supplier=Arrow+Europe; ComponentLink6URL: http://www.onlinecomponents.com/datasheet/vj0402y103jxxac.aspx?p=35767938&src-supplier=Onlinecomponents.com; ComponentLink6Description: http://www.onlinecomponents.com/datasheet/vj0402y103jxxac.aspx?p=35767938&src-supplier=Onlinecomponents.com; ComponentLink7URL: http://www.vishay.com/docs/45040/autospec.pdf?src-supplier=Future+Electronics; ComponentLink7Description: http://www.vishay.com/docs/45040/autospec.pdf?src-supplier=Future+Electronics; ComponentLink8URL: http://www.vishay.com/docs/45199/commseri.pdf?src-supplier=Avnet+Europe; ComponentLink8Description: http://www.vishay.com/docs/45199/commseri.pdf?src-supplier=Avnet+Europe; Supplier Part Number 1: 720-1897-2-ND; LCSC Part Number: C2175851
footprint Cap-0402
pins: 1, 2

## VJ1206Y224KXAMT
designator C?, comment 220nF
CAP CER 0.22UF 50V X7R 1206; Manufacturer: Vishay Vitramon; Manufacturer Part Number: VJ1206Y224KXAMT; Dielectric Material: Ceramic; Tolerance: 10%; Item Type: Capacitor; Supplier 1: Digi-Key; Stock 1: 5727; Pricing 1: 1=0.57, 10=0.403, 50=0.3044, 100=0.2652, 500=0.19642, 1000=0.16696 (USD); Mount: Surface Mount; Case/Package: 1206; Number of Pins: 2; Case Code (Metric): 3216; Case Code (Imperial): 1206; Min Operating Temperature: -55°C; Max Operating Temperature: 125°C; Capacitance: 220nF; Packaging: Tape and Reel; Package Quantity: 2500; Voltage Rating (DC): 50V; Dielectric: X7R; Series: VJ; Voltage Rating: 50V; Termination: SMD/SMT; Construction: Flat; Length: 3.2mm; Width: 0.063inch; Height: 1.7mm; Height - Seated (Max): 0.067inch; Thickness: 0.067inch; Depth: 1.6mm; RoHS Compliant: Yes; REACH SVHC: Unknown; ComponentLink1URL: http://www.vishay.com/docs/45199/vjcommercialseries.pdf?src-supplier=Digi-Key; ComponentLink1Description: http://www.vishay.com/docs/45199/vjcommercialseries.pdf?src-supplier=Digi-Key; ComponentLink2URL: http://www.vishay.com/docs/45051/vjvitramonpackaging.pdf?src-supplier=Digi-Key; ComponentLink2Description: http://www.vishay.com/docs/45051/vjvitramonpackaging.pdf?src-supplier=Digi-Key; ComponentLink3URL: http://www.mouser.com/ds/2/427/vjcommercialseries-222796.pdf?src-supplier=Mouser; ComponentLink3Description: http://www.mouser.com/ds/2/427/vjcommercialseries-222796.pdf?src-supplier=Mouser; Supplier Part Number 1: 720-1395-1-ND; LCSC Part Number: C2172665
footprint Cap-1206 (SMD 1206)
pins: 1, 2

## VKMB1001E101MV
designator C?, comment 100uF
25V 5mm 10mm 100uF 100kHz SMD,5x10mm Aluminum Electrolytic Cap- SMD ROHS; Manufacturer: Ymin; Manufacturer Part Number: VKMB1001E101MV; Item Type: Capacitor; Value: 100uF; Voltage: 25V; ComponentLink1Description: LCSC; ComponentLink1URL: https://lcsc.com/product-detail/Aluminum-Electrolytic-Capacitors-SMD_Ymin-VKMB1001E101MV_C487322.html; LCSC Part Number: C487322
footprint VKMB1001E101MV_ (25V 5mm 10mm 100uF)
pins: 1, 2

## VKME1451J221MV
designator C?, comment 220uF
220uF ±20% 63V 10mm 14.5mm 1.2A 100kHz 10000hrs 105℃ -55℃~+105℃ SMD,10x14.5mm Aluminum Electrolytic Capacitors - SMD RoHS; Manufacturer: Ymin; Package: SMD,10x14.5mm; Capacitance: 220uF; Tolerance: ±20%; Rated Voltage: 63V; φD: 10mm; L: 14.5mm; Ripple Current: 1.2A 100kHz; Lifetime @ Temp: 10000hrs 105℃; Operating Temperature: -55℃~+105℃; LCSC Part Number: C487391; ComponentLink1Description: LCSC; ComponentLink1URL: https://www.lcsc.com/product-detail/Aluminum-Electrolytic-Capacitors-SMD_Ymin-VKME1451J221MV_C487391.html; Item Type: Capacitor
footprint VKME1451J221MV (220uF ±20% 63V 10mm 14.5mm 1.2A 100kHz 10000hrs 105? -55?~+105? SMD,10x14.5mm Aluminum Electrolytic Capacitors - SMD RoHS)
pins: 1, 2

## VLCF5020T-2R7N1R7
designator L?, comment 2.7uH
FIXED IND 2.7UH 1.76A 71 MOHM; Manufacturer: TDK; Manufacturer Part Number: VLCF5020T-2R7N1R7; Core Material: Ferrite; DC Resistance (DCR): 71mR; Tolerance: 30%; Test Frequency: 100kHz; Max DC Current: 1.7A; RMS Current (Irms): 2.51A; Shielding: Shielded; Item Type: Inductor; Supplier 1: Digi-Key; RoHS: Yes; Category: Fixed Inductors; Stock 1: 1500; Pricing 1: 1=0.79000, 10=0.69300, 25=0.64360, 50=0.54440, 100=0.49500, 250=0.46528 (USD); Mount: Surface Mount; Case/Package: Nonstandard; Number of Pins: 2; Min Operating Temperature: -40°C; Max Operating Temperature: 105°C; Inductance: 2.7uH; Packaging: Tape and Reel; Inductance Tolerance: 30%; Resistor Type: Wirewound; Termination: SMD/SMT; Package Quantity: 500; Current Rating: 1.76A; Saturation Current: 1.76A; Length: 0.197inch; Width: 0.197inch; Height: 2mm; Depth: 5.2mm; Height - Seated (Max): 0.079inch; Radiation Hardening: No; Lead Free: Lead Free; Military Standard: Not; REACH SVHC: No SVHC; ComponentLink1URL: https://datasheet.ciiva.com/11799/0900766b807a173e-11799677.pdf?src-supplier=RSComponents; ComponentLink1Description: https://datasheet.ciiva.com/11799/0900766b807a173e-11799677.pdf?src-supplier=RSComponents; ComponentLink2URL: https://datasheet.ciiva.com/15993/e531-vlcf5020-15993504.pdf?src-supplier=Onlinecomponents.com; ComponentLink2Description: https://datasheet.ciiva.com/15993/e531-vlcf5020-15993504.pdf?src-supplier=Onlinecomponents.com; ComponentLink3URL: https://datasheet.ciiva.com/8045/516785-8045805.pdf?src-supplier=Element14; ComponentLink3Description: https://datasheet.ciiva.com/8045/516785-8045805.pdf?src-supplier=Element14; Supplier Part Number 1: 445-3194-1-ND; LCSC Part Number: C307836
footprint VLCF5020T-2R7N1R7. (FIXED IND 2.7UH 1.76A 71MOHM SMD)
pins: 1, 2

## VLCF5024T-330MR50-2
designator L?, comment 33uH
FIXED IND 33UH 500MA 275MOHM SMD; Manufacturer: TDK; Manufacturer Part Number: VLCF5024T-330MR50-2; Core Material: Ferrite; Tolerance: 20%; Shielding: Shielded; DC Resistance (DCR): 275mR; Test Frequency: 100kHz; RMS Current (Irms): 1.24A; Item Type: Inductor; Supplier 1: Mouser; RoHS: Yes; Category: Fixed Inductors; Stock 1: 559; Pricing 1: 1=1.23000, 10=0.91900, 50=0.91900, 100=0.77200, 1000=0.57700, 10000=0.53200 (USD); Mounting Technology: Surface Mount; Case/Package: Nonstandard; Min Operating Temperature: -40°C; Max Operating Temperature: 105°C; Packaging: Cut Tape; Inductance Tolerance: 20%; Package Quantity: 500; Current Rating: 500mA; Saturation Current: 500mA; Resistor Type: Wirewound; Value: 33uH; Max DC Current: 500mA; Series: VLCF; Length: 0.197inch; Width: 0.197inch; Height: 2.4mm; Height - Seated (Max): 0.094inch; Reach SVHC Compliant: Yes; RoHS Compliant: Yes; ComponentLink1URL: https://datasheet.ciiva.com/22729/1724253-22729224.pdf?src-supplier=Element14; ComponentLink1Description: https://datasheet.ciiva.com/22729/1724253-22729224.pdf?src-supplier=Element14; Supplier Part Number 1: 810-VLCF524T330MR502; LCSC Part Number: C2046704
footprint VLCF5024T-330MR50-2
pins: 1, 2

## VLS5045EX-3R3N
designator L?, comment 3.3uH
FIXED IND 3.3UH 4.2A 35.1MOHM SM; Manufacturer: TDK; Manufacturer Part Number: VLS5045EX-3R3N; Core Material: Ferrite; Saturation Current: 5.2A; Shielding: Shielded; DC Resistance (DCR): 35.1mR; Test Frequency: 100kHz; Tolerance: 30%; Item Type: Inductor; Supplier: Digi-Key; Supplier Part Number: 445-174398-1-ND; RoHS: Yes; Category: Fixed Inductors; Stock: 140631; Pricing: 1=0.42, 10=0.371, 25=0.3448, 50=0.2916, 100=0.2651, 250=0.2492, 500=0.2227 (USD); Mounting Technology: Surface Mount; Case/Package: Nonstandard; Min Operating Temperature: -40°C; Max Operating Temperature: 105°C; Packaging: Cut Tape; Value: 3.3uH; Series: VLS-EX; RoHS Compliant: Yes; ComponentLink1URL: http://www.farnell.com/datasheets/2339796.pdf?src-supplier=Farnell; ComponentLink1Description: http://www.farnell.com/datasheets/2339796.pdf?src-supplier=Farnell; ComponentLink2URL: https://media.digikey.com/pdf/Data%20Sheets/TDK%20PDFs/VLS-EX_Series_Br.pdf?src-supplier=Digi-Key; ComponentLink2Description: https://media.digikey.com/pdf/Data%20Sheets/TDK%20PDFs/VLS-EX_Series_Br.pdf?src-supplier=Digi-Key; ComponentLink3URL: http://www.farnell.com/datasheets/2339796.pdf?src-supplier=Element14; ComponentLink3Description: http://www.farnell.com/datasheets/2339796.pdf?src-supplier=Element14; ComponentLink4URL: http://www.farnell.com/datasheets/2339796.pdf?src-supplier=Newark; ComponentLink4Description: http://www.farnell.com/datasheets/2339796.pdf?src-supplier=Newark; LCSC Part Number: C307875
footprint VLS5045EX-3R3N
pins: 1, 2

## VLS5045EX-100M-H
designator L?, comment 10uH
FIXED IND 10UH 2.5A 79.3MOHM SMD; Manufacturer: TDK; Manufacturer Part Number: VLS5045EX-100M-H; Item Type: Inductor; Supplier: Rs; Supplier Part Number: 2119532P; RoHS: Yes; Category: Fixed Inductors; Stock: 650; Pricing: 100=0.239, 250=0.211, 500=0.197, 1000=0.183 (GBP); LCSC Part Number: C1845361; ComponentLink1Description: LCSC; ComponentLink1URL: https://www.lcsc.com/product-detail/Power-Inductors_TDK-VLS5045EX-100M-H_C1845361.html
footprint VLS5045EX-100M-H
pins: 1, 2

## VLS6045EX-221M
designator L?, comment 220uH
FIXED IND 220UH 500MA 1.495 OHM; Manufacturer: TDK; Manufacturer Part Number: VLS6045EX-221M; Core Material: Ferrite; Shielding: Shielded; DC Resistance (DCR): 1.15R; Test Frequency: 100kHz; Tolerance: 20%; Item Type: Inductor; Supplier 1: Digi-Key; RoHS: Yes; Category: Fixed Inductors; Stock 1: 4102; Pricing 1: 1=0.51000, 10=0.44300, 25=0.41120, 50=0.34780, 100=0.31620, 250=0.29728, 500=0.26564 (USD); Mount: Surface Mount; Case/Package: Nonstandard; Min Operating Temperature: -40°C; Max Operating Temperature: 105°C; Packaging: Tape and Reel; Resistor Type: Wirewound; Inductance: 220uH; Current Rating: 500mA; Length: 0.236inch; Width: 0.236inch; Height - Seated (Max): 0.177inch; RoHS Compliant: Yes; ComponentLink1URL: https://media.digikey.com/pdf/Data%20Sheets/TDK%20PDFs/VLS-EX_Series_Br.pdf?src-supplier=Digi-Key; ComponentLink1Description: https://media.digikey.com/pdf/Data%20Sheets/TDK%20PDFs/VLS-EX_Series_Br.pdf?src-supplier=Digi-Key; Supplier Part Number 1: 445-173047-1-ND; LCSC Part Number: C404509
footprint VLS6045EX-221M.
pins: 1, 2

## VLS252012HBX-100M-1
designator L?, comment 10uH
FIXED IND 10UH 1A 540 MOHM SMD; Manufacturer: TDK; Manufacturer Part Number: VLS252012HBX-100M-1; Core Material: Metal; Saturation Current: 850mA; Shielding: Shielded; DC Resistance (DCR): 540mR; Test Frequency: 1MHz; Tolerance: 20%; Item Type: Inductor; Supplier 1: Arrow Electronics; RoHS: Yes; Category: Fixed Inductors; Stock 1: 10000; Pricing 1: 2000=0.12770, 24000=0.12640 (USD); Mount: Surface Mount; Case/Package: 1008; Case Code (Metric): 2520; Case Code (Imperial): 1008; Min Operating Temperature: -40°C; Max Operating Temperature: 105°C; Packaging: Cut Tape; Resistor Type: Wirewound; Inductance: 10uH; Current Rating: 1A; RMS Current (Irms): 1A; Inductance Tolerance: 20%; Series: VLS-HBX-1; Length: 0.098inch; Width: 0.079inch; Height - Seated (Max): 0.047inch; Reach SVHC Compliant: Yes; RoHS Compliant: Yes; ComponentLink1URL: http://www.farnell.com/datasheets/1866267.pdf?src-supplier=Farnell; ComponentLink1Description: http://www.farnell.com/datasheets/1866267.pdf?src-supplier=Farnell; ComponentLink2URL: http://www.farnell.com/datasheets/2608160.pdf?src-supplier=Farnell; ComponentLink2Description: http://www.farnell.com/datasheets/2608160.pdf?src-supplier=Farnell; ComponentLink3URL: http://www.farnell.com/datasheets/2130011.pdf?src-supplier=Element14; ComponentLink3Description: http://www.farnell.com/datasheets/2130011.pdf?src-supplier=Element14; ComponentLink4URL: http://www.farnell.com/datasheets/1866267.pdf?src-supplier=Newark; ComponentLink4Description: http://www.farnell.com/datasheets/1866267.pdf?src-supplier=Newark; ComponentLink5URL: https://product.tdk.com/info/en/catalog/datasheets/inductor_commercial_power_vls252012hbx-1_en.pdf?src-supplier=Digi-Key; ComponentLink5Description: https://product.tdk.com/info/en/catalog/datasheets/inductor_commercial_power_vls252012hbx-1_en.pdf?src-supplier=Digi-Key; ComponentLink6URL: https://product.tdk.com/info/en/catalog/datasheets/inductor_commercial_power_vls252012hbx-1_en.pdf?ref_disty=digikey&src-supplier=Digi-Key; ComponentLink6Description: https://product.tdk.com/info/en/catalog/datasheets/inductor_commercial_power_vls252012hbx-1_en.pdf?ref_disty=digikey&src-supplier=Digi-Key; Supplier Part Number 1: VLS252012HBX-100M-1; LCSC Part Number: C88532
footprint IND-1008 (2520 Metric)
pins: 1, 2

## VMMC0571J150MV
designator C?, comment 15uF
15uF 63V ±20% SMD,D6.3xL5.7mm Aluminum Electrolytic Capacitors - SMD ROHS; Manufacturer: Ymin; Manufacturer Part Number: VMMC0571J150MV; Package: SMD,D6.3xL5.7mm; LCSC Part Number: C487115; Item Type: Capacitor; ComponentLink1Description: LCSC; ComponentLink1URL: https://www.lcsc.com/product-detail/Aluminum-Electrolytic-Capacitors-SMD_Ymin-VMMC0571J150MV_C487115.html
footprint VMMC0571J150MV
pins: 1, 2

## VRD2828PTX
designator U?
300mA 75dB@1kHz 10nA 90mV 2.8V~2.8V 2 6V SOT-23-6 Linear Voltage Regulators (LDO) ROHS; Manufacturer: AnaSem; Manufacturer Part Number: VRD2828PTX; Item Type: IC; Package: SOT-23-6; ComponentLink1Description: LCSC; ComponentLink1URL: https://lcsc.com/product-detail/Linear-Voltage-Regulators-LDO_AnaSem-VRD2828PTX_C697937.html; LCSC Part Number: C697937
footprint SOT-23-6
pins: 1 EN1, 2 VIN, 3 EN2, 4 VOUT2, 5 VSS, 6 VOUT1